# Altium footprint library PcbLib1.PcbLib: 12 footprints
Each footprint in its own frame and in the unit in brackets; x right, y up, seen from the top. Pads: shape width x height; smd on the part's side, far side on the other; paste and mask are expansions set on the pad; w line width, h text height; cw(c..) or ccw(c..) is an arc to the next point about the centre after c.
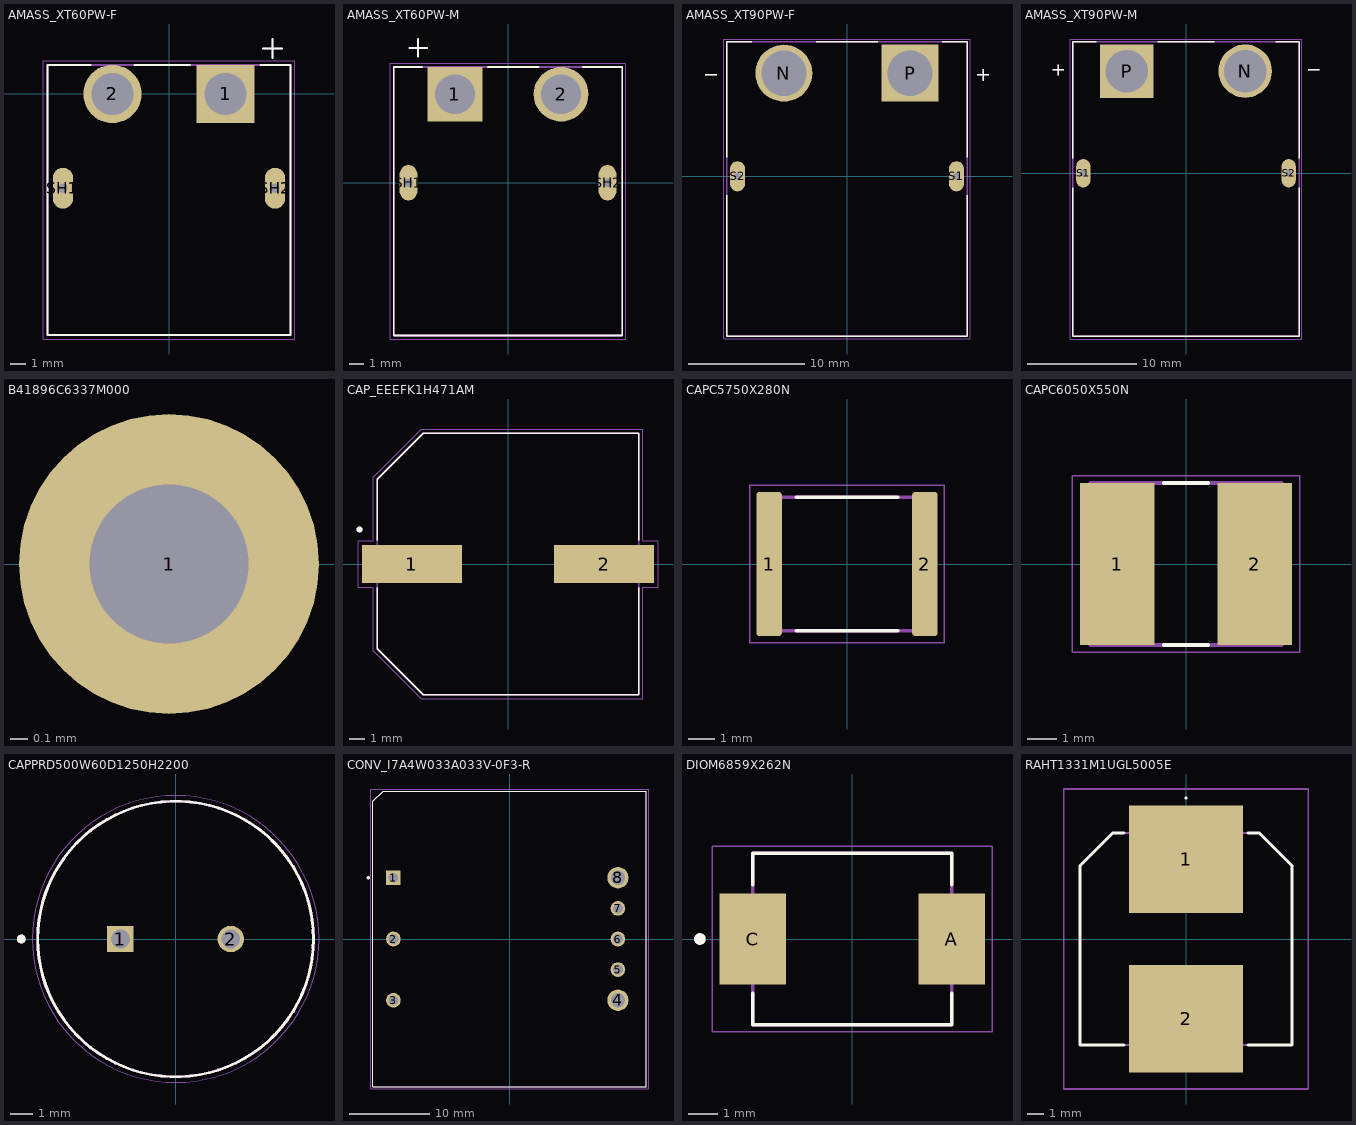
[diagram p0: the footprints below, top view; thin cyan lines are the x and y axes]

## AMASS_XT60PW-F [mm]
height 8.4
pads (4):
  rect 3.716x3.716 / inner round 3.716 / far side rect 3.716x3.716 hole 2.7 mask+0.102: 1(3.6,0)
  round 3.716 hole 2.7 mask+0.102: 2(-3.6,0)
  oval 1.3x2.6 hole 0.6 square mask+0.102: SH1(-6.75,-6) SH2(6.75,-6)
Top Overlay:
  lines w0.127: -5.01,1.85 -7.75,1.85 -7.75,-15.35 7.75,-15.35 7.75,1.85 5.81,1.85 ; -2.19,1.85 1.34,1.85 ; 6,2.9 7.2,2.9 ; 6.6,2.3 6.6,3.5
Mechanical 13:
  lines w0.127: 6,2.9 7.2,2.9 ; 6.6,2.3 6.6,3.5 ; -7.75,-15.35 7.75,-15.35 7.75,1.85 -7.75,1.85 -7.75,-15.35
Mechanical 15:
  lines w0.05: -8,-15.6 8,-15.6 8,2.11 -8,2.11 -8,-15.6
3D body "step_temp.STEP": height 8.4, standoff -2.55, extent -7.75,-15.35 7.75,1.85

## AMASS_XT60PW-M [mm]
height 8.4
pads (4):
  rect 3.716x3.716 / inner round 3.716 / far side rect 3.716x3.716 hole 2.7 mask+0.102: 1(-3.6,6)
  round 3.716 hole 2.7 mask+0.102: 2(3.6,6)
  oval 1.2x2.4 hole 0.6 square mask+0.102: SH1(-6.75,0) SH2(6.75,0)
Top Overlay:
  lines w0.127: -6.7,9.15 -5.5,9.15 ; -6.1,8.55 -6.1,9.75 ; -5.828,7.85 -7.75,7.85 -7.75,-10.35 7.75,-10.35 7.75,7.85 5.078,7.85 ; -1.372,7.85 2.072,7.85
Mechanical 13:
  lines w0.127: -6.7,9.15 -5.5,9.15 ; -6.1,8.55 -6.1,9.75 ; -7.75,-10.35 -7.75,7.85 7.75,7.85 7.75,-10.35 -7.75,-10.35
Mechanical 15:
  lines w0.05: -8,-10.6 -8,8.11 8,8.11 8,-10.6 -8,-10.6
3D body "step_temp.STEP": height 8.4, standoff -2.55, extent -7.75,-10.35 7.75,7.85

## AMASS_XT90PW-F [mm]
height 10.3
pads (4):
  round 4.916 hole 3.9: N(-5.45,8.9)
  rect 4.916x4.916 / inner round 4.916 / far side rect 4.916x4.916 hole 3.9: P(5.45,8.9)
  oval 1.3x2.6 hole 0.6 square: S1(9.45,0) S2(-9.45,0)
Top Overlay:
  lines w0.127: -12.25,8.75 -11.25,8.75 ; -10.4,-1.62 -10.4,-13.8 10.4,-13.8 10.4,-1.62 ; -10.4,1.62 -10.4,11.6 -8.228,11.6 ; -2.672,11.6 2.672,11.6 ; 8.228,11.6 10.4,11.6 10.4,1.62 ; 11.25,8.75 12.25,8.75 ; 11.75,8.25 11.75,9.25
Mechanical 13:
  lines w0.127: -12.25,8.75 -11.25,8.75 ; 11.25,8.75 12.25,8.75 ; 11.75,8.25 11.75,9.25 ; -10.4,-13.8 -10.4,11.6 10.4,11.6 10.4,-13.8 -10.4,-13.8
Mechanical 15:
  lines w0.05: -10.65,-14.05 10.65,-14.05 10.65,11.85 -10.65,11.85 -10.65,-14.05
3D body "step_temp.STEP": height 10.3, standoff -3.2, extent -10.65,-13.8 10.65,11.6

## AMASS_XT90PW-M [mm]
pads (4):
  round 4.916 hole 3.9: N(5.45,9.4)
  rect 4.916x4.916 / inner round 4.916 / far side rect 4.916x4.916 hole 3.9: P(-5.45,9.4)
  oval 1.3x2.6 hole 0.6 square: S1(-9.45,0) S2(9.45,0)
Top Overlay:
  lines w0.127: -12.25,9.5 -11.25,9.5 ; -11.75,9 -11.75,10 ; -10.4,-1.35 -10.4,-15 10.4,-15 10.4,-1.35 ; -10.4,1.4 -10.4,12.1 -8.25,12.1 ; -2.6,12.1 2.6,12.1 ; 8.25,12.1 10.4,12.1 10.4,1.4 ; 11.25,9.5 12.25,9.5
Mechanical 13:
  lines w0.127: -12.25,9.5 -11.25,9.5 ; -11.75,9 -11.75,10 ; 11.25,9.5 12.25,9.5 ; -10.4,-15 10.4,-15 10.4,12.1 -10.4,12.1 -10.4,-15
Mechanical 15:
  lines w0.05: -10.65,-15.25 10.65,-15.25 10.65,12.35 -10.65,12.35 -10.65,-15.25
3D body "step_temp.STEP": height 10.3, standoff -3.2, extent -10.6,-15 10.6,12.1

## B41896C6337M000 [mm] "Aluminum Electrolytic Capacitors - Radial Leaded / 50VDC 330uF 20% STD Leads"
pads (1):
  round 1.7 hole 0.9: 1(1.4,0)

## CAP_EEEFK1H471AM [mm]
pads (2):
  rect 6.5x2.5 smd: 1(-6.25,0) 2(6.25,0)
Top Overlay:
  circle w0.2: c-9.65,2.25 r0.1
  lines w0.127: -8.5,-1.57 -8.5,-5.5 -5.5,-8.5 8.5,-8.5 8.5,-1.57 ; -8.5,1.57 -8.5,5.5 -5.5,8.5 8.5,8.5 8.5,1.57
Mechanical 13:
  circle w0.2: c-9.65,2.25 r0.1
  lines w0.127: -8.5,-5.5 -5.5,-8.5 8.5,-8.5 8.5,8.5 -5.5,8.5 -8.5,5.5 -8.5,-5.5
Mechanical 15:
  lines w0.05: -9.75,-1.5 -9.75,1.5 -8.75,1.5 -8.75,5.625 -5.625,8.75 8.75,8.75 8.75,1.5 9.75,1.5 9.75,-1.5 8.75,-1.5 8.75,-8.75 -5.625,-8.75 -8.75,-5.625 -8.75,-1.5 -9.75,-1.5
3D body "step_temp.STEP": height 16.5, standoff 0, extent -9.2,-8.5 9.2,8.5

## CAPC5750X280N [mm]
height 2.8
pads (2):
  rrect25% 0.96x5.41 smd paste+0 mask+0.102: 1(-2.925,0) 2(2.925,0)
Top Overlay:
  lines w0.127: -1.905,-2.5 1.905,-2.5 ; -1.905,2.5 1.905,2.5
Mechanical 13:
  lines w0.127: -2.85,-2.5 -2.85,2.5 2.85,2.5 2.85,-2.5 -2.85,-2.5
Mechanical 15:
  lines w0.05: -3.655,-2.955 -3.655,2.955 3.655,2.955 3.655,-2.955 -3.655,-2.955
3D body "step_temp.STEP": height 2.8, standoff 0, extent -2.85,-2.5 2.85,2.5

## CAPC6050X550N [mm]
pads (2):
  rect 2.53x5.51 smd paste+0 mask+0.102: 1(-2.336,0) 2(2.336,0)
Top Overlay:
  lines w0.127: -0.75,-2.75 0.75,-2.75 ; -0.75,2.75 0.75,2.75
Mechanical 13:
  lines w0.127: -3.25,-2.75 3.25,-2.75 3.25,2.75 -3.25,2.75 -3.25,-2.75
Mechanical 15:
  lines w0.05: -3.853,-3.003 3.853,-3.003 3.853,3.003 -3.853,3.003 -3.853,-3.003
3D body "step_temp.STEP": height 5.5, standoff 0, extent -3,-2.5 3,2.5

## CAPPRD500W60D1250H2200 [mm]
height 22
pads (2):
  rect 1.2x1.2 / inner round 1.2 / far side rect 1.2x1.2 hole 0.85 mask+0.102: 1(-2.5,0)
  round 1.2 hole 0.85 mask+0.102: 2(2.5,0)
Top Overlay:
  circle w0.127: c0,0 r6.25
  circle w0.2: c-7,0 r0.1
Mechanical 13:
  circle w0.127: c0,0 r6.25
  circle w0.2: c-7,0 r0.1
Mechanical 15:
  circle w0.05: c0,0 r6.5
3D body "step_temp.STEP": height 22, standoff -4, extent -6.25,-6.247 6.25,6.247

## CONV_I7A4W033A033V-0F3-R [mm]
height 12
pads (8):
  rect 1.83x1.83 / inner round 1.83 / far side rect 1.83x1.83 hole 1.22: 1(-14.478,7.62)
  round 1.83 hole 1.22: 2(-14.478,0) 3(-14.478,-7.62) 5(13.462,-3.81) 6(13.462,0) 7(13.462,3.81)
  round 2.655 hole 1.77: 4(13.462,-7.62) 8(13.462,7.62)
Top Overlay:
  circle w0.2: c-17.6,7.62 r0.1
  lines w0.127: -17.018,-18.415 17.018,-18.415 17.018,18.415 -15.748,18.415 -17.018,17.145 -17.018,-18.415
Mechanical 13:
  circle w0.2: c-17.6,7.62 r0.1
  lines w0.127: -17.018,-18.415 17.018,-18.415 17.018,18.415 -15.748,18.415 -17.018,17.145 -17.018,-18.415
Mechanical 15:
  lines w0.05: -17.268,-18.665 17.268,-18.665 17.268,18.665 -17.268,18.665 -17.268,-18.665
3D body "step_temp.STEP": height 25.1, standoff -4.44, extent -17.036,-18.415 17,18.415

## DIOM6859X262N [mm]
height 2.62
pads (2):
  rect 2.29x3.12 smd: A(3.43,0) C(-3.43,0)
Top Overlay:
  circle w0.2: c-5.25,0 r0.1
  lines w0.127: -3.427,-1.88 -3.427,-2.953 3.427,-2.953 3.427,-1.88 ; -3.427,1.88 -3.427,2.953 3.427,2.953 3.427,1.88
Mechanical 13:
  circle w0.2: c-5.25,0 r0.1
  lines w0.127: -3.427,-2.953 -3.427,2.953 3.427,2.953 3.427,-2.953 -3.427,-2.953
Mechanical 15:
  lines w0.05: -4.825,-3.203 -4.825,3.203 4.825,3.203 4.825,-3.203 -4.825,-3.203
3D body "step_temp.STEP": height 2.62, standoff 0, extent -3.97,-2.953 3.97,2.953

## RAHT1331M1UGL5005E [mm]
pads (2):
  rect 7x6.6 smd: 1(0,4.9) 2(0,-4.9)
Top Overlay:
  lines w0.1: 0,8.6 ccw(c0,8.65) 0,8.7 ccw(c0,8.65) 0,8.6
  lines w0.2: -3.8,-6.5 -6.5,-6.5 -6.5,4.5 -4.5,6.5 -3.8,6.5 ; 3.8,-6.5 6.5,-6.5 6.5,4.5 4.5,6.5 3.8,6.5
Mechanical 15:
  lines w0.1: -6.5,-6.5 6.5,-6.5 6.5,4.5 4.5,6.5 -4.5,6.5 -6.5,4.5 -6.5,0 -6.5,-6.5
Mechanical 20:
  lines w0.1: -7.5,-9.2 7.5,-9.2 7.5,9.2 -7.5,9.2 -7.5,-9.2
3D body "RAHT1331M1UGL5005E.stp": height 13.52, standoff 0.02, extent -6.55,-7.3 6.5,7.1